# Altium footprint library MTGW_R09.PcbLib: 55 footprints (part 2 of 4)
Each footprint in its own frame and in the unit in brackets; x right, y up, seen from the top. Pads: shape width x height; smd on the part's side, far side on the other; paste and mask are expansions set on the pad; w line width, h text height; cw(c..) or ccw(c..) is an arc to the next point about the centre after c.
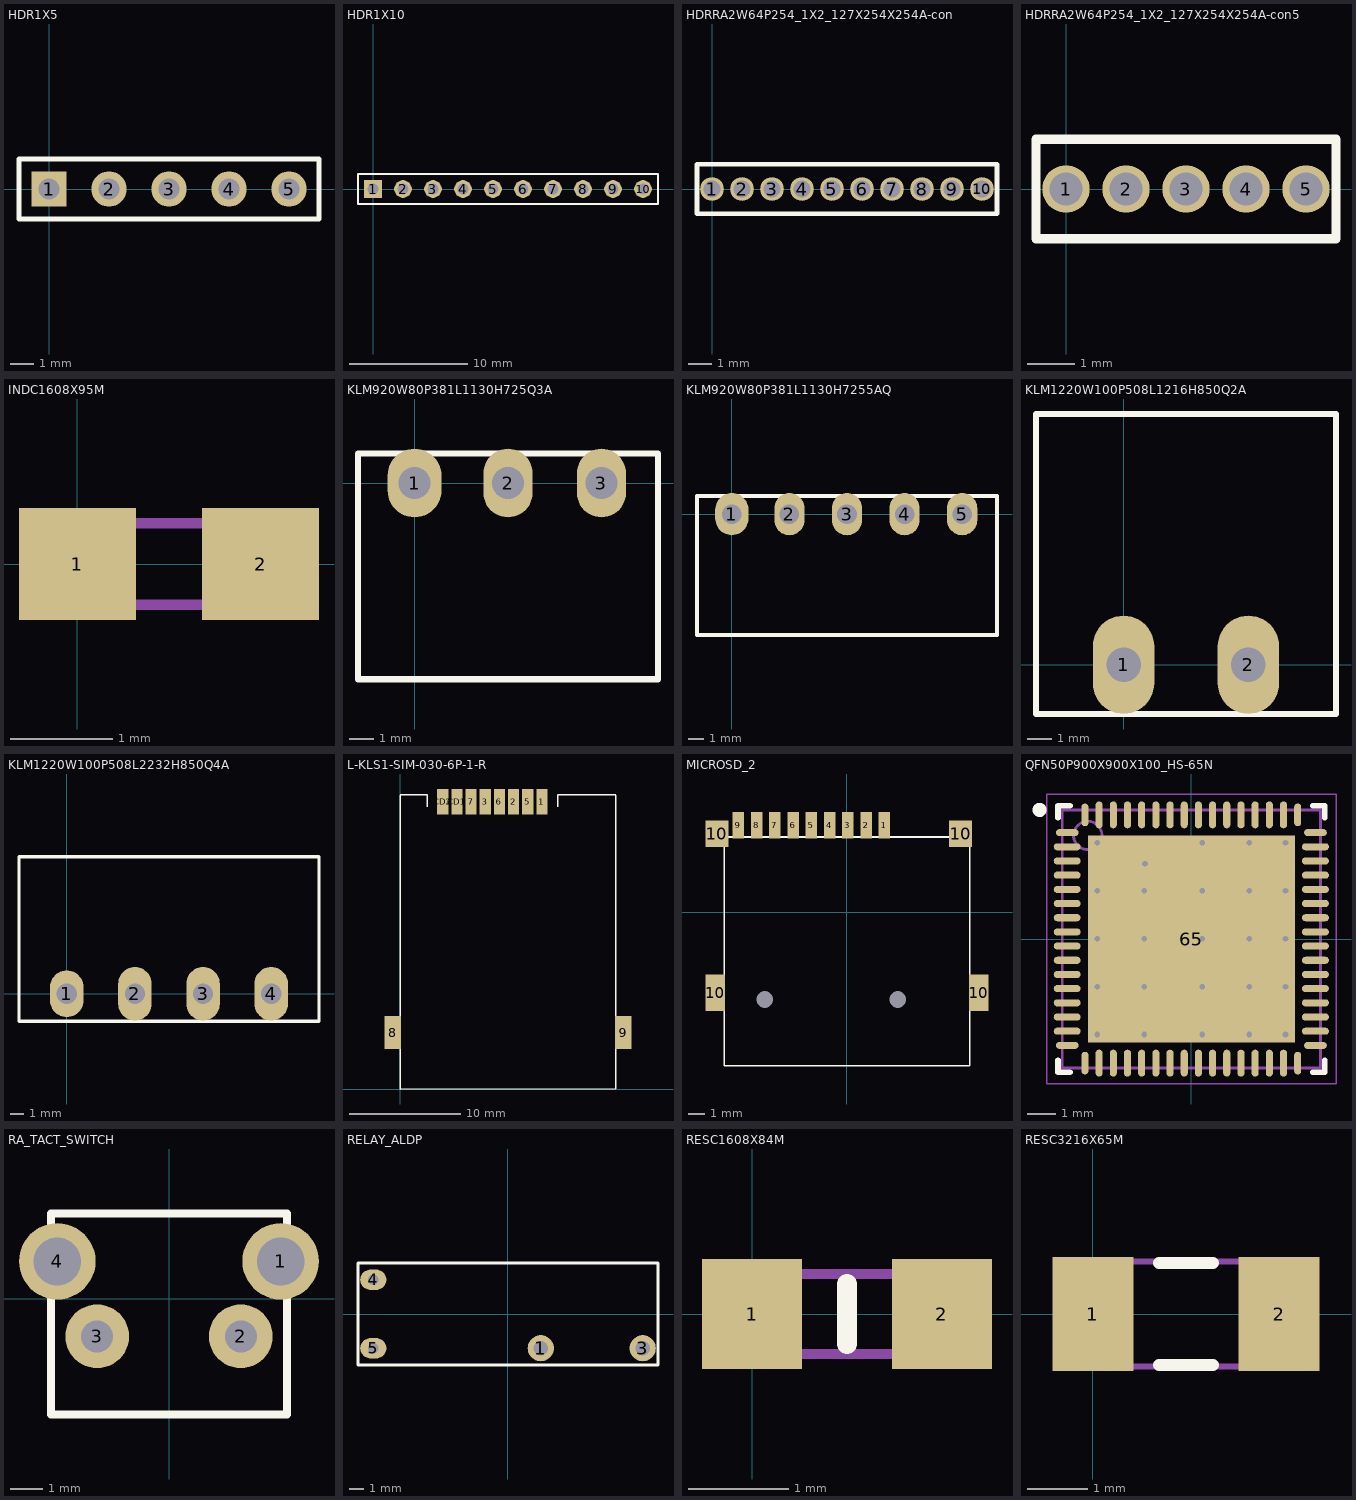
[diagram p1: the footprints below, top view; thin cyan lines are the x and y axes]

## HDR1X5 [mm]
pads (5):
  rect 1.5x1.5 hole 0.9: 1(0,0)
  round 1.5 hole 0.9: 2(2.54,0) 3(5.08,0) 4(7.62,0) 5(10.16,0)
Top Overlay:
  lines w0.2: -1.27,-1.27 11.43,-1.27 11.43,1.27 -1.27,1.27 -1.27,-1.27

## HDR1X10 [mm]
pads (10):
  rect 1.5x1.5 hole 0.9: 1(0,0)
  round 1.5 hole 0.9: 2(2.54,0) 3(5.08,0) 4(7.62,0) 5(10.16,0) 6(12.7,0) 7(15.24,0) 8(17.78,0) 9(20.32,0) 10(22.86,0)
Top Overlay:
  lines w0.2: -1.27,-1.27 24.13,-1.27 24.13,1.27 0.635,1.27 -1.27,1.27 -1.27,-1.27

## HDRRA2W64P254_1X2_127X254X254A-con [mm]
pads (10):
  round 1 hole 0.7: 1(0,0) 2(1.27,0) 3(2.54,0) 4(3.81,0) 5(5.08,0) 6(6.35,0) 7(7.62,0) 8(8.89,0) 9(10.16,0) 10(11.43,0)
Top Overlay:
  lines w0.2: -0.635,-1.05 12.065,-1.05 12.065,1.05 -0.635,1.05 -0.635,-1.05

## HDRRA2W64P254_1X2_127X254X254A-con5 [mm]
pads (5):
  round 1 hole 0.7: 1(0,0) 2(1.27,0) 3(2.54,0) 4(3.81,0) 5(5.08,0)
Top Overlay:
  lines w0.2: -0.635,-1.05 -0.635,1.05 5.715,1.05 5.715,-1.05 -0.635,-1.05

## INDC1608X95M [mm]
pads (2):
  rect 1.15x1.1 smd: 1(0,0) 2(1.8,0)
Mechanical 2:
  lines w0.1: 0.45,-0.4 0.45,0.4 ; 1.35,-0.4 1.35,0.4 ; 0.1,-0.4 0.1,0.4 1.7,0.4 1.7,-0.4 0.1,-0.4

## KLM920W80P381L1130H725Q3A [mm]
pads (3):
  oval 2.2x2.8 hole 1.3: 1(0,0)
  oval 2x2.8 hole 1.3: 2(3.81,0) 3(7.62,0)
Top Overlay:
  lines w0.254: -2.305,-8 9.925,-8 9.925,1.2 -2.305,1.2 -2.305,-8
3D body "PV03-3,81-H-P.stp": height 7.26, standoff -3.39, extent -2.305,-8 9.925,1.2

## KLM920W80P381L1130H7255AQ [mm]
pads (5):
  oval 2.2x2.8 hole 1.3: 1(0,0)
  oval 2x2.8 hole 1.3: 2(3.81,0) 3(7.62,0) 4(11.43,0) 5(15.24,0)
Top Overlay:
  lines w0.254: -2.305,-8 -2.305,1.2 17.545,1.2 17.545,-8 -2.305,-8
3D body "PV05-3,81-H-P.stp": height 7.26, standoff -3.39, extent -2.305,-8 17.545,1.2

## KLM1220W100P508L1216H850Q2A [mm]
pads (2):
  oval 2.5x4 hole 1.4: 1(0,0) 2(5.08,0)
Top Overlay:
  lines w0.254: -3.56,-2 -3.56,10.2 8.64,10.2 8.64,-2 -3.56,-2
3D body "PV02-5,08-H-P.stp": height 8.51, standoff -4.09, extent -3.56,-2 8.6,10

## KLM1220W100P508L2232H850Q4A [mm]
pads (4):
  oval 2.5x3.5 hole 1.5: 1(0,0)
  oval 2.5x4 hole 1.5: 2(5.08,0) 3(10.16,0) 4(15.24,0)
Top Overlay:
  lines w0.254: -3.56,-2.032 -3.56,10.2 18.8,10.2 18.8,-2.032 -3.56,-2.032
3D body "PV04-5,08-H-P.stp": height 8.51, standoff -3.99, extent -3.54,-1.9 18.78,10.3

## L-KLS1-SIM-030-6P-1-R [mm]
pads (10):
  rect 1x2.3 smd: 1(12.69,25.76) 2(10.15,25.76) 3(7.61,25.76) 5(11.42,25.76) 6(8.88,25.76) 7(6.34,25.76) CD1(5.07,25.76) CD2(3.8,25.76)
  rect 1.5x2.95 smd: 8(-0.7,5.06) 9(20,5.06)
Top Overlay:
  lines w0.127: 0,26.34 0,0 19.3,0 19.3,26.34 ; 0,26.4 2.4,26.4 2.4,25.3 ; 14.1,25.3 14.1,26.4 19.3,26.4
3D body "47553-2001.stp": height 1.94, standoff -0.56, extent -0.861,-0.095 20.09,26.405

## MICROSD_2 [mm]
pads (15):
  round 0 hole 1: 0(-4.95,-5.25) 0(3.05,-5.25)
  rect 0.7x1.6 smd: 1(2.25,5.25) 2(1.15,5.25) 3(0.05,5.25) 4(-1.05,5.25) 5(-2.15,5.25) 6(-3.25,5.25) 7(-4.35,5.25) 8(-5.45,5.25) 9(-6.55,5.25)
  rect 1.2x2.2 smd: 10(-7.95,-4.85) 10(7.95,-4.85)
  rect 1.4x1.6 smd: 10(-7.85,4.75) 10(6.85,4.75)
Top Overlay:
  lines w0.1: -7.4,-9.25 7.4,-9.25 7.4,4.55 -7.4,4.55 -7.4,-9.25
3D body "User Library-microsd card.step": height 1.95, standoff 0.95, extent -6.502,-11.659 4.51,3.341
3D body "User Library-112J-TXAR-R_C_1-1.step": height 1.86, standoff -0.59, extent -8.05,-9.25 8.05,5.753

## QFN50P900X900X100_HS-65N [mm]
pads (65):
  oval 0.8x0.25 smd: 1(-4.375,3.75) 16(-4.375,-3.75) 33(4.375,-3.75) 48(4.375,3.75)
  oval 0.95x0.25 smd: 2(-4.375,3.25) 3(-4.375,2.75) 4(-4.375,2.25) 5(-4.375,1.75) 6(-4.375,1.25) 7(-4.375,0.75) 8(-4.375,0.25) 9(-4.375,-0.25) 10(-4.375,-0.75) 11(-4.375,-1.25) 12(-4.375,-1.75) 13(-4.375,-2.25) 14(-4.375,-2.75) 15(-4.375,-3.25) 34(4.375,-3.25) 35(4.375,-2.75) 36(4.375,-2.25) 37(4.375,-1.75) 38(4.375,-1.25) 39(4.375,-0.75) 40(4.375,-0.25) 41(4.375,0.25) 42(4.375,0.75) 43(4.375,1.25) 44(4.375,1.75) 45(4.375,2.25) 46(4.375,2.75) 47(4.375,3.25)
  oval 0.25x0.8 smd: 17(-3.75,-4.375) 32(3.75,-4.375) 49(3.75,4.375) 64(-3.75,4.375)
  oval 0.25x0.95 smd: 18(-3.25,-4.375) 19(-2.75,-4.375) 20(-2.25,-4.375) 21(-1.75,-4.375) 22(-1.25,-4.375) 23(-0.75,-4.375) 24(-0.25,-4.375) 25(0.25,-4.375) 26(0.75,-4.375) 27(1.25,-4.375) 28(1.75,-4.375) 29(2.25,-4.375) 30(2.75,-4.375) 31(3.25,-4.375) 50(3.25,4.375) 51(2.75,4.375) 52(2.25,4.375) 53(1.75,4.375) 54(1.25,4.375) 55(0.75,4.375) 56(0.25,4.375) 57(-0.25,4.375) 58(-0.75,4.375) 59(-1.25,4.375) 60(-1.75,4.375) 61(-2.25,4.375) 62(-2.75,4.375) 63(-3.25,4.375)
  rect 7.3x7.3 smd: 65(0,0)
via 3.318,-1.678 diameter 0.5 hole 0.2
via 2.04,-1.678 diameter 0.5 hole 0.2
via 3.318,0.013 diameter 0.5 hole 0.2
via 2.04,0.013 diameter 0.5 hole 0.2
via 3.318,1.703 diameter 0.5 hole 0.2
via 2.04,1.703 diameter 0.5 hole 0.2
via 3.318,3.394 diameter 0.5 hole 0.2
via 2.04,3.394 diameter 0.5 hole 0.2
via 0.381,3.394 diameter 0.5 hole 0.2
via -1.633,2.657 diameter 0.5 hole 0.2
via 2.04,-3.368 diameter 0.5 hole 0.2
via -3.318,3.394 diameter 0.5 hole 0.2
via 0.381,-3.368 diameter 0.5 hole 0.2
via 0.381,-1.678 diameter 0.5 hole 0.2
via 0.381,0.013 diameter 0.5 hole 0.2
via 0.381,1.703 diameter 0.5 hole 0.2
via 3.318,-3.368 diameter 0.5 hole 0.2
via -3.318,-1.678 diameter 0.5 hole 0.2
via -3.318,-3.368 diameter 0.5 hole 0.2
via -1.659,-3.368 diameter 0.5 hole 0.2
via -1.659,-1.678 diameter 0.5 hole 0.2
via -3.318,0.013 diameter 0.5 hole 0.2
via -1.659,0.013 diameter 0.5 hole 0.2
via -3.318,1.703 diameter 0.5 hole 0.2
via -1.659,1.703 diameter 0.5 hole 0.2
Top Overlay:
  circle w0.25: c-5.35,4.55 r0.125
  lines w0.2: -4.7,-4.275 -4.7,-4.7 -4.275,-4.7 ; -4.7,4.275 -4.7,4.7 -4.275,4.7 ; 4.275,-4.7 4.7,-4.7 4.7,-4.275 ; 4.275,4.7 4.7,4.7 4.7,4.275
Mechanical 15:
  lines w0.05: -5.1,-5.1 5.1,-5.1 5.1,5.1 -5.1,5.1 -5.1,-5.1
  lines w0.1: -0.5,0 0.5,0 ; 0,-0.5 0,0.5
Mechanical 18:
  circle w0.1: c-3.65,3.65 r0.5
  lines w0.1: -4.55,-4.55 4.55,-4.55 4.55,4.55 -4.55,4.55 -4.55,-4.55
3D body "QFN50P900X900X100_HS-65N.step": height 1, standoff 0, extent -4.56,-4.56 4.56,4.56

## RA_TACT_SWITCH [mm]
pads (4):
  round 2.4 hole 1.5: 1(3.5,1.175) 4(-3.5,1.175)
  round 2 hole 1: 2(2.25,-1.175) 3(-2.25,-1.175)
Top Overlay:
  lines w0.254: -3.7,-3.626 -3.7,2.675 3.7,2.675 3.7,-3.625 -3.7,-3.625
3D body "User Library-SWITCH, TACTILE, RIGHT ANGLE, 12VDC, 50MA, 3_15MM ACTUATOR, WEALTH METAL TC-0240Z.STEP": height 7, standoff -4, extent -3.7,-4.325 3.7,2.975

## RELAY_ALDP [mm]
pads (4):
  round 1.8 hole 1: 1(2.25,-2.351) 3(9.25,-2.351)
  oval 1.8x1.4 hole 0.7: 4(-9.25,2.351) 5(-9.248,-2.351)
Top Overlay:
  lines w0.2: -10.3,-3.499 10.3,-3.499 ; -10.3,-3.488 -10.3,3.5 10.3,3.501 ; 10.3,-3.5 10.3,3.488
3D body: height 16, standoff 0, extent -10.272,-3.492 10.3,3.493

## RESC1608X84M [mm]
pads (2):
  rect 1x1.1 smd: 1(0,0) 2(1.9,0)
Top Overlay:
  lines w0.2: 0.95,-0.3 0.95,0.3
Mechanical 2:
  lines w0.1: 0.05,-0.4 1.85,-0.4 1.85,0.4 0.05,0.4 0.05,-0.4
3D body "User Library-Chip Resistor2RESC1608X50N.STEP": height 0.5, standoff 0, extent 0.15,-0.4 1.75,0.4

## RESC3216X65M [mm]
pads (2):
  rect 1.35x1.9 smd: 1(0,0) 2(3.1,0)
Top Overlay:
  lines w0.2: 1.1,-0.85 2,-0.85 ; 1.1,0.85 2,0.85
Mechanical 2:
  lines w0.1: -0.125,-0.875 3.225,-0.875 3.225,0.875 -0.125,0.875 -0.125,-0.875
3D body "SW3dPS-1206 SMD Resistor.STEP": height 1, standoff 0, extent -0.05,-0.8 3.15,0.8